# Altium footprint library TitansLib.PcbLib: 333 footprints (part 12 of 21)
Each footprint in its own frame and in the unit in brackets; x right, y up, seen from the top. Pads: shape width x height; smd on the part's side, far side on the other; paste and mask are expansions set on the pad; w line width, h text height; cw(c..) or ccw(c..) is an arc to the next point about the centre after c.
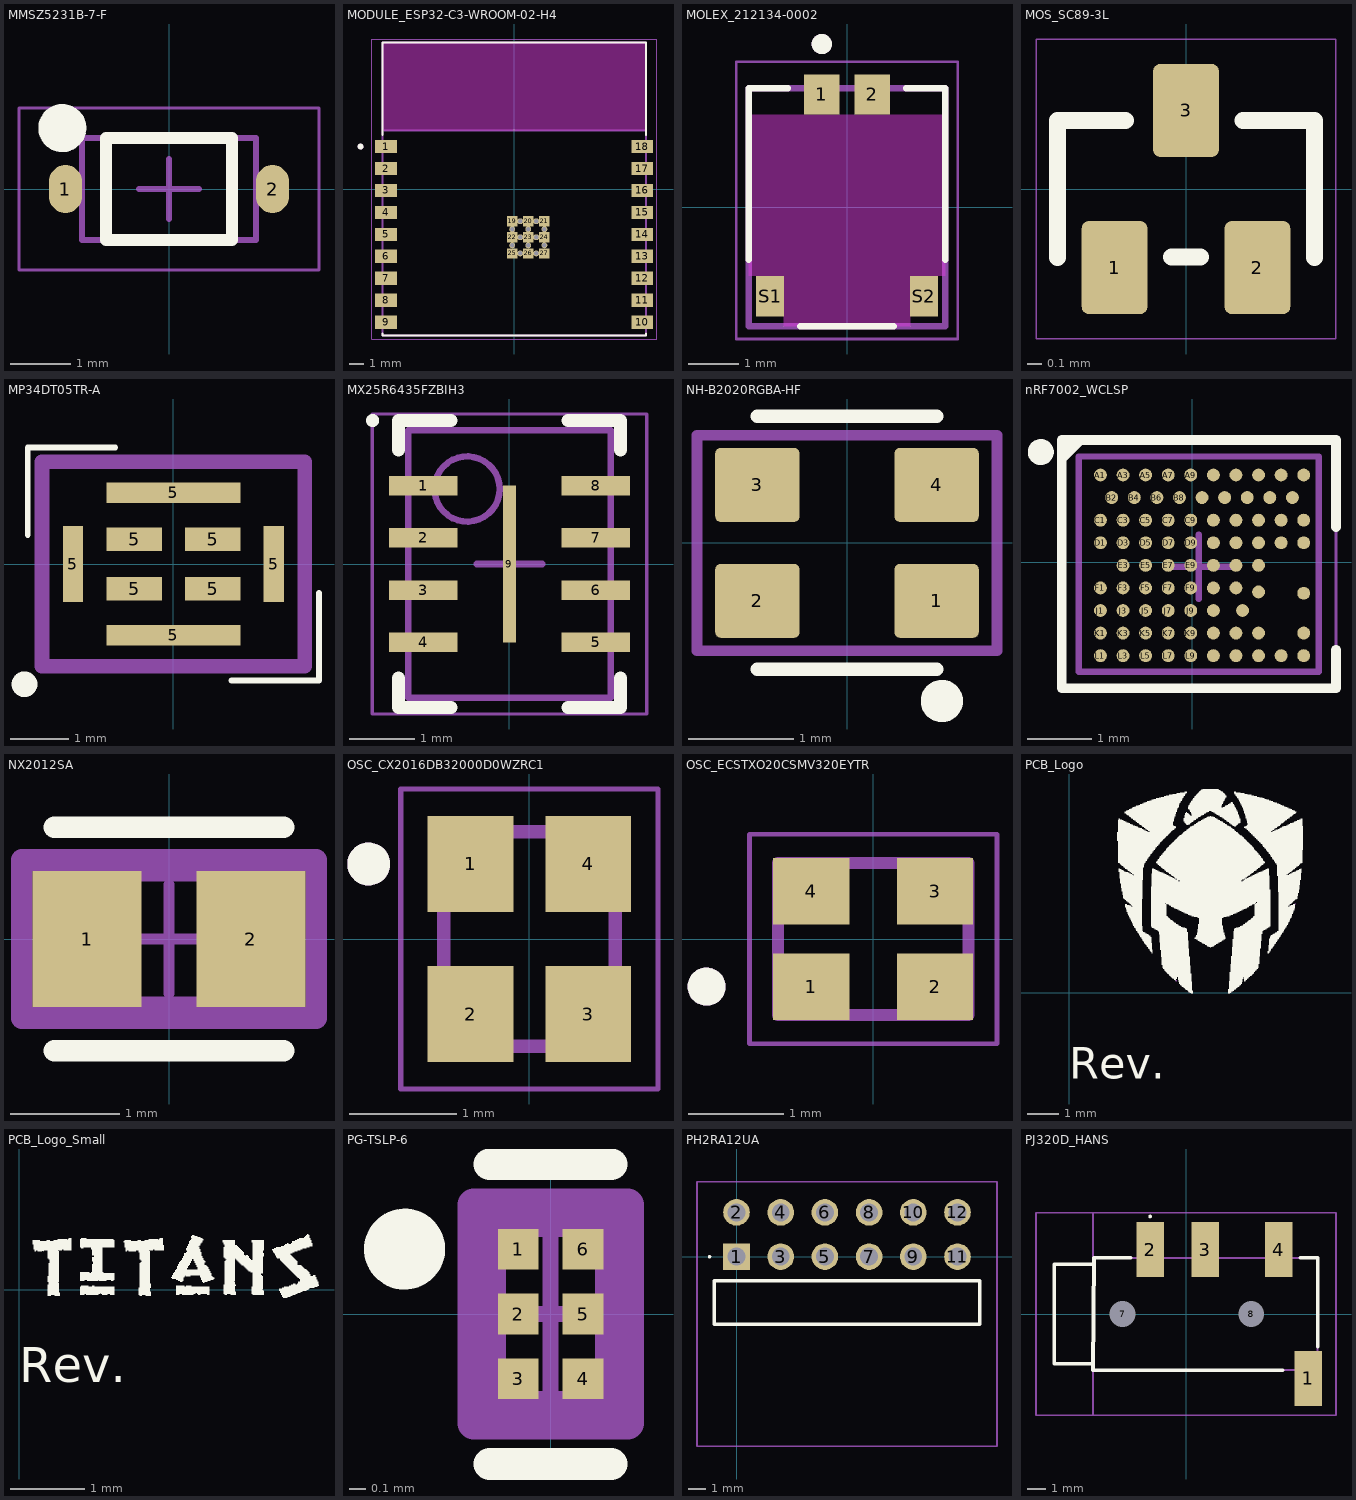
[diagram p11: the footprints below, top view; thin cyan lines are the x and y axes]

## MMSZ5231B-7-F [mm] "TSOP, 2-Leads, Body 1,55x2,70mm, Pitch 1,00mm, IPC Low Density"
height 1.35
pads (2):
  oval 0.55x0.8 smd: 1(-1.725,0) 2(1.725,0)
Top Overlay:
  circle w0.4: c-1.778,1.016 r0.2
  lines w0.2: -1.05,-0.85 -1.05,0.85 1.05,0.85 1.05,-0.85 -1.05,-0.85
Top Courtyard:
  lines w0.05: -2.5,-1.35 -2.5,1.35 2.5,1.35 2.5,-1.35 -2.5,-1.35
  lines w0.1: -0.5,0 0.5,0 ; 0,-0.5 0,0.5
Top Assembly:
  lines w0.1: -1.45,-0.85 -1.45,0.85 1.45,0.85 1.45,-0.85 -1.45,-0.85
3D body "Diode_Diodes_MMSZ5231B-7-F_eec.STEP": height 0.25, standoff 0, extent -2.979,-1.275 2.979,1.275

## MODULE_ESP32-C3-WROOM-02-H4 [mm]
pads (39):
  rect 1.5x0.9 smd: 1(-8.75,2.9) 2(-8.75,1.4) 3(-8.75,-0.1) 4(-8.75,-1.6) 5(-8.75,-3.1) 6(-8.75,-4.6) 7(-8.75,-6.1) 8(-8.75,-7.6) 9(-8.75,-9.1) 10(8.75,-9.1) 11(8.75,-7.6) 12(8.75,-6.1) 13(8.75,-4.6) 14(8.75,-3.1) 15(8.75,-1.6) 16(8.75,-0.1) 17(8.75,1.4) 18(8.75,2.9)
  rect 0.7x0.7 smd: 19(-0.14,-2.2) 20(0.96,-2.2) 21(2.06,-2.2) 22(-0.14,-3.3) 23(0.96,-3.3) 24(2.06,-3.3) 25(-0.14,-4.4) 26(0.96,-4.4) 27(2.06,-4.4)
  round 0.4 hole 0.3 mask+0: 28(0.41,-2.2) 29(1.51,-2.2) 30(-0.14,-2.75) 31(0.96,-2.75) 32(2.06,-2.75) 33(0.41,-3.3) 34(1.51,-3.3) 35(-0.14,-3.85) 36(0.96,-3.85) 37(2.06,-3.85) 38(0.41,-4.4) 39(1.51,-4.4)
Top Overlay:
  circle w0.2: c-10.5,2.9 r0.1
  lines w0.127: -9,-9.87 -9,-10 9,-10 9,-9.87 ; -9,3.67 -9,10 9,10 9,3.67
Keep-Out Layer:
  region: 9,4 -9,4 -9,10 9,10
  region: 9,4 -9,4 -9,10 9,10
Mechanical 13:
  circle w0.2: c-10.5,2.9 r0.1
  lines w0.127: -9,4 9,4 ; -9,4 -9,-10 9,-10 9,4 ; -9,4 -9,10 9,10 9,4
Mechanical 15:
  lines w0.05: -9.75,-10.25 9.75,-10.25 9.75,10.25 -9.75,10.25 -9.75,-10.25
3D body "step_temp.STEP": height 3.35, standoff 0, extent -9,-10 9,10

## MOLEX_212134-0002 [mm] "Surface mount pin header connector, right angle, 2 positions, 0.039\" (1.00mm)"
height 1.2
pads (4):
  rect 0.7x0.8 smd: 1(-0.5,2.24) 2(0.5,2.24)
  rect 0.55x0.8 smd: S1(-1.525,-1.76) S2(1.525,-1.76)
Top Overlay:
  circle w0.2: c-0.5,3.24 r0.1
  lines w0.127: -1.95,-1.04 -1.95,2.36 -1.17,2.36 ; -0.93,-2.36 0.93,-2.36 ; 1.17,2.36 1.95,2.36 1.95,-1.04
Keep-Out Layer:
  region: 1.95,-1.36 1.25,-1.36 1.25,-2.36 -1.25,-2.36 -1.25,-1.36 -1.95,-1.36 -1.95,1.84 1.95,1.84
Mechanical 13:
  circle w0.2: c-0.5,3.24 r0.1
  lines w0.127: -1.95,-2.36 1.95,-2.36 1.95,2.36 -1.95,2.36 -1.95,-2.36
Mechanical 15:
  lines w0.05: -2.2,-2.61 -2.2,2.89 2.2,2.89 2.2,-2.61 -2.2,-2.61
3D body "2121340002.stp": height 1.18, standoff -0.02, extent -1.954,-2.29 1.946,2.5

## MOS_SC89-3L [mm] "MCD-02221"
height 0.8
pads (3):
  rrect21% 0.46x0.65 smd mask+0.05: 1(-0.5,-0.55) 2(0.5,-0.55) 3(0,0.55)
Top Overlay:
  lines w0.12: -0.9,-0.48 -0.9,0.48 -0.425,0.48 ; -0.1,-0.475 0.1,-0.475 ; 0.4,0.48 0.9,0.48 0.9,-0.48
Top Courtyard:
  lines w0.01: -1.05,-1.05 -1.05,1.05 -0.275,1.05 1.05,1.05 1.05,-1.05 -1.05,-1.05
3D body: height 0.1, standoff 0, extent 0.315,-0.847 0.683,-0.48
3D body: height 0.1, standoff 0, extent -0.685,-0.847 -0.317,-0.48
3D body: height 0.1, standoff 0, extent -0.183,0.48 0.185,0.847
3D body: height 0.85, standoff 0, extent -0.855,-0.48 0.855,0.48
3D body "User Library-FDY102PZ.STEP": height 0.78, standoff 0, extent -0.85,-0.85 0.85,0.85

## MP34DT05TR-A [mm]
pads (8):
  rect 0.35x1.3 smd mask+0.07: 5(-1.725,0) 5(1.725,0)
  rect 0.95x0.4 smd mask+0.07: 5(-0.675,-0.425) 5(-0.675,0.425) 5(0.675,-0.425) 5(0.675,0.425)
  rect 2.3x0.35 smd mask+0.07: 5(0,-1.225) 5(0,1.225)
Top Overlay:
  circle w0.254: c-2.557,-2.064 r0.094
  lines w0.1: -2.5,0.5 -2.5,2 -1,2 ; 1,-2 2.5,-2 2.5,-0.5
Top Assembly:
  lines w0.254: -2.254,-1.754 2.254,-1.754 2.254,1.754 -2.254,1.754 -2.254,-1.754
  text ".Designator" at -1.9,-0.107 h1
Mechanical 15:
  lines w0.15: -2.25,-1.75 2.25,-1.75 2.25,1.75 -2.25,1.75 -2.25,-1.75
3D body "MP34DT05TR-A.STEP": height 1.11, standoff 0.01, extent -1.99,-1.509 2.01,1.491

## MX25R6435FZBIH3 [mm] "SON, 8-Leads, Body 4,00x3,00mm, Pitch 0,80mm, Thermal Pad 2,40x0,20mm, IPC Medium Density"
height 0.6
pads (9):
  rect 1.05x0.3 smd: 1(-1.32,1.2) 2(-1.32,0.4) 3(-1.32,-0.4) 4(-1.32,-1.2) 5(1.32,-1.2) 6(1.32,-0.4) 7(1.32,0.4) 8(1.32,1.2)
  rect 0.2x2.4 smd: 9(0,0)
Top Overlay:
  circle w0.1: c-2.1,2.2 r0.05
  lines w0.2: -1.7,-1.75 -1.7,-2.2 -0.895,-2.2 ; -1.7,1.75 -1.7,2.2 -0.895,2.2 ; 0.895,-2.2 1.7,-2.2 1.7,-1.75 ; 0.895,2.2 1.7,2.2 1.7,1.75
Top Courtyard:
  lines w0.05: -2.105,-2.3 2.105,-2.3 2.105,2.3 -2.105,2.3 -2.105,-2.3
  lines w0.1: -0.5,0 0.5,0 ; 0,-0.5 0,0.5
Top Assembly:
  circle w0.1: c-0.65,1.15 r0.5
  lines w0.1: -1.55,-2.05 1.55,-2.05 1.55,2.05 -1.55,2.05 -1.55,-2.05
3D body "SON80P300X60_HS-9N.step": height 0.6, standoff 0.05, extent -1.55,-2.05 1.55,2.05

## NH-B2020RGBA-HF [mm]
pads (4):
  rrect14% 0.8x0.7 smd: 1(0.85,-0.55) 2(-0.85,-0.55) 3(-0.85,0.55) 4(0.85,0.55)
Top Overlay:
  circle w0.2: c0.9,-1.5 r0.1
  lines w0.127: -0.85,-1.2 0.85,-1.2 ; -0.85,1.2 0.85,1.2
Top Courtyard:
  lines w0.1: -1.423,-1.023 1.423,-1.023 1.423,1.023 -1.423,1.023 -1.423,-1.023
3D body "FOSHAN-FM-B2020RGBA-HG.SLDPRT": height 1.07, standoff 0.01, extent -1.07,-1.05 1.07,1.05

## nRF7002_WCLSP [mm]
pads (81):
  round 0.2 smd mask-0.01: A1(-1.426,1.351) A3(-1.076,1.351) A5(-0.726,1.351) A7(-0.376,1.351) A9(-0.026,1.351) A11(0.325,1.351) A13(0.675,1.351) A16(1.025,1.351) A18(1.375,1.351) A20(1.725,1.351) B2(-1.251,1.001) B4(-0.901,1.001) B6(-0.551,1.001) B8(-0.201,1.001) B10(0.149,1.001) B12(0.499,1.001) B15(0.849,1.001) B17(1.199,1.001) B19(1.549,1.001) C1(-1.426,0.651) C3(-1.076,0.651) C5(-0.726,0.651) C7(-0.376,0.651) C9(-0.026,0.651) C11(0.325,0.651) C13(0.675,0.651) C16(1.025,0.651) C18(1.375,0.651) C20(1.725,0.651) D1(-1.426,0.3) D3(-1.076,0.3) D5(-0.726,0.3) D7(-0.376,0.3) D9(-0.026,0.3) D11(0.325,0.3) D13(0.675,0.3) D16(1.025,0.3) D18(1.375,0.3) D20(1.725,0.3) E3(-1.076,-0.05) E5(-0.726,-0.05) E7(-0.376,-0.05) E9(-0.026,-0.05) E11(0.325,-0.05) E13(0.675,-0.05) E16(1.025,-0.05) F1(-1.426,-0.4) F3(-1.076,-0.4) F5(-0.726,-0.4) F7(-0.376,-0.4) F9(-0.026,-0.4) F11(0.325,-0.4) F13(0.675,-0.4) G16(1.025,-0.463) H20(1.725,-0.483) J1(-1.426,-0.75) J3(-1.076,-0.75) J5(-0.726,-0.75) J7(-0.376,-0.75) J9(-0.026,-0.75) J11(0.325,-0.75) J14(0.777,-0.75) K1(-1.426,-1.1) K3(-1.076,-1.1) K5(-0.726,-1.1) K7(-0.376,-1.1) K9(-0.026,-1.1) K11(0.325,-1.1) K13(0.675,-1.1) K16(1.025,-1.1) K20(1.725,-1.1) L1(-1.426,-1.45) L3(-1.076,-1.45) L5(-0.726,-1.45) L7(-0.376,-1.45) L9(-0.026,-1.45) L11(0.325,-1.45) L13(0.675,-1.45) L16(1.025,-1.45) L18(1.375,-1.45) L20(1.725,-1.45)
Top Overlay:
  circle w0.254: c-2.351,1.707 r0.074
  region: -2.024,1.893 -1.955,1.823 -1.706,1.823 -1.96,1.569
  lines w0.15: -2.024,-1.957 2.226,-1.957 ; -2.024,-1.951 -2.024,1.899 ; -2.024,1.893 2.226,1.893 ; 2.226,-1.951 2.226,-1.357 ; 2.226,0.545 2.226,1.899
Mechanical 13:
  lines w0.1: -1.759,-1.702 -1.759,1.638 1.961,1.638 1.961,-1.702 -1.759,-1.702
Mechanical 15:
  lines w0.05: -2.024,-1.957 -2.024,1.893 2.226,1.893 2.226,-1.957 -2.024,-1.957
  lines w0.1: -0.4,-0.071 0.6,-0.071 ; 0.101,-0.571 0.101,0.429
3D body "BGA90C34P10X9_372X334X54.step": height 0.54, standoff 0, extent -1.759,-1.702 1.961,1.638

## NX2012SA [mm]
pads (2):
  rect 1x1.25 smd paste+0 mask+0.05: 1(-0.75,0) 2(0.75,0)
Top Overlay:
  lines w0.2: -1.05,-1.025 1.05,-1.025 ; -1.05,1.025 1.05,1.025
Top 3D Body:
  lines w0.2: -1.05,-0.625 -1.05,0.625 1.05,0.625 1.05,-0.625 -1.05,-0.625
Top Courtyard:
  lines w0.2: -1.35,-0.725 -1.35,0.725 1.35,0.725 1.35,-0.725 -1.35,-0.725
Top Component Center:
  lines w0.1: -0.5,0 0.5,0 ; 0,-0.5 0,0.5
Top Assembly:
  lines w0.2: -1.35,-0.725 -1.35,0.725 1.35,0.725 1.35,-0.725 -1.35,-0.725
3D body "Crys_NDK_NX2012SA-32_768KHZ-EXS00A-MU00527_eec.STEP": height 0.25, standoff 0, extent -1.35,-0.725 1.35,0.725

## OSC_CX2016DB32000D0WZRC1 [mm]
height 0.45
pads (4):
  rect 0.8x0.9 smd mask+0.05: 1(-0.55,0.7) 2(-0.55,-0.7) 3(0.55,-0.7) 4(0.55,0.7)
Top Overlay:
  circle w0.2: c-1.5,0.7 r0.1
Mechanical 13:
  circle w0.2: c-1.5,0.7 r0.1
  lines w0.127: -0.8,-1 0.8,-1 0.8,1 -0.8,1 -0.8,-1
Mechanical 15:
  lines w0.05: -1.2,-1.4 -1.2,1.4 1.2,1.4 1.2,-1.4 -1.2,-1.4
3D body "step_temp.STEP": height 0.45, standoff 0, extent -0.8,-1 0.8,1

## OSC_ECSTXO20CSMV320EYTR [mm]
height 0.8
pads (4):
  rect 0.8x0.7 smd mask+0.05: 1(-0.65,-0.5) 2(0.65,-0.5) 3(0.65,0.5) 4(-0.65,0.5)
Top Overlay:
  circle w0.2: c-1.75,-0.5 r0.1
Mechanical 13:
  circle w0.2: c-1.75,-0.5 r0.1
  lines w0.127: -1,-0.8 1,-0.8 1,0.8 -1,0.8 -1,-0.8
Mechanical 15:
  lines w0.05: -1.3,-1.1 -1.3,1.1 1.3,1.1 1.3,-1.1 -1.3,-1.1
3D body "step_temp.STEP": height 0.8, standoff 0, extent -1,-0.8 1,0.8

## PCB_Logo [mm] "Logo"
height 0.025
Top Overlay:
  drawing of 4 lines, arcs and shapes, not listed
  text ".Title" at 0.001,-1.784 h1.7
  text "Rev." at 0,-3.032 h1.7
  text ".Revision" at 2.668,-3.032 h1.7
Bottom 3D Body:
  region: 7.129,2.802 7.129,2.779 7.106,2.779 7.106,2.802
  region: 3.382,0.388 3.382,0.365 3.359,0.365 3.359,0.388

## PCB_Logo_Small [mm] "Logo"
height 0.025
Top Overlay:
  drawing of 8 lines, arcs and shapes, not listed
  text ".Title" at 0,-0.734 h0.8
  text ".Revision" at 1.396,-1.395 h0.8
  text "Rev." at 0,-1.39 h0.8

## PG-TSLP-6 [mm]
pads (6):
  rect 0.25x0.25 smd paste-1000 mask+0: 1(-0.2,0.4) 2(-0.2,0) 3(-0.2,-0.4) 4(0.2,-0.4) 5(0.2,0) 6(0.2,0.4)
Top Overlay:
  circle w0.25: c-0.9,0.4 r0.125
  lines w0.2: -0.375,-0.925 0.375,-0.925 ; -0.375,0.925 0.375,0.925
Top Paste:
  circle w0.125: c-0.2,0.4 r0.062
  circle w0.125: c-0.2,0 r0.062
  circle w0.125: c-0.2,-0.4 r0.062
  circle w0.125: c0.2,-0.4 r0.062
  circle w0.125: c0.2,0 r0.062
  circle w0.125: c0.2,0.4 r0.062
Top 3D Body:
  lines w0.2: -0.375,-0.575 0.375,-0.575 0.375,0.575 -0.375,0.575 -0.375,-0.575
Top Courtyard:
  lines w0.2: -0.475,-0.675 0.475,-0.675 0.475,0.675 -0.475,0.675 -0.475,-0.675
Top Component Center:
  lines w0.1: -0.5,0 0.5,0 ; 0,-0.5 0,0.5
Top Assembly:
  lines w0.2: -0.475,-0.675 0.475,-0.675 0.475,0.675 -0.475,0.675 -0.475,-0.675
3D body "IC_Infineon_BGS12P2L6E6327XTSA1_eec.STEP": height 0.25, standoff 0, extent -0.475,-0.675 0.475,0.675

## PH2RA12UA [mm]
pads (12):
  rect 1.53x1.53 hole 1.02: 1(0,0)
  round 1.53 hole 1.02: 2(0,2.54) 3(2.54,0) 4(2.54,2.54) 5(5.08,0) 6(5.08,2.54) 7(7.62,0) 8(7.62,2.54) 9(10.16,0) 10(10.16,2.54) 11(12.7,0) 12(12.7,2.54)
Top Overlay:
  lines w0.1: -1.6,0 ccw(c-1.55,0) -1.5,0 ccw(c-1.55,0) -1.6,0
  lines w0.2: -1.27,-3.9 -1.27,-1.4 13.97,-1.4 13.97,-3.9 -1.27,-3.9
Mechanical 13:
  lines w0.1: -1.27,-3.9 -1.27,-1.4 13.97,-1.4 13.97,-3.9 -1.27,-3.9
Mechanical 15:
  lines w0.1: -2.27,-10.9 -2.27,4.305 14.97,4.305 14.97,-10.9 -2.27,-10.9
3D body "PH2RA-12-UA.STEP": height 5, standoff -3, extent -1.27,-9.892 13.97,2.868

## PJ320D_HANS [mm]
pads (6):
  rect 1.5x3 smd: 1(6.65,-3.5) 2(-1.95,3.5) 3(1.05,3.5) 4(5.05,3.5)
  round 0.65 hole 1.4 unplated: 7(-3.45,0) 8(3.55,0)
Top Overlay:
  lines w0.1: -1.95,5.25 cw(c-1.95,5.3) -1.95,5.35 cw(c-1.95,5.3) -1.95,5.25
  lines w0.2: -5.05,-2.7 -7.15,-2.7 -7.15,2.7 -5.05,2.7 ; -3,3.05 -5,3.05 -5.05,-3.05 5.25,-3.05 ; 6.223,3.05 7.15,3.05 7.15,-1.778
Mechanical 13:
  lines w0.1: -5.05,-2.7 -7.15,-2.7 -7.15,2.7 -5.05,2.7 ; -5.05,-3.05 -5.05,3.05 7.15,3.05 7.15,-3.05 -5.05,-3.05
Mechanical 15:
  lines w0.1: 8.15,-5.5 -5.05,-5.5 -5.05,5.5 8.15,5.5 ; 8.15,-5.5 8.15,5.5 ; 8.15,-5.5 -8.15,-5.5 -8.15,5.5 8.15,5.5 ; 8.15,-5.5 8.15,5.5
3D body "HanElectricity PJ-320D.step": height 5.02, standoff -0.98, extent -7.15,-4.064 7.15,4.236